# Altium footprint library TIE_2025.PcbLib: 27 footprints (part 2 of 2)
Each footprint in its own frame and in the unit in brackets; x right, y up, seen from the top. Pads: shape width x height; smd on the part's side, far side on the other; paste and mask are expansions set on the pad; w line width, h text height; cw(c..) or ccw(c..) is an arc to the next point about the centre after c.
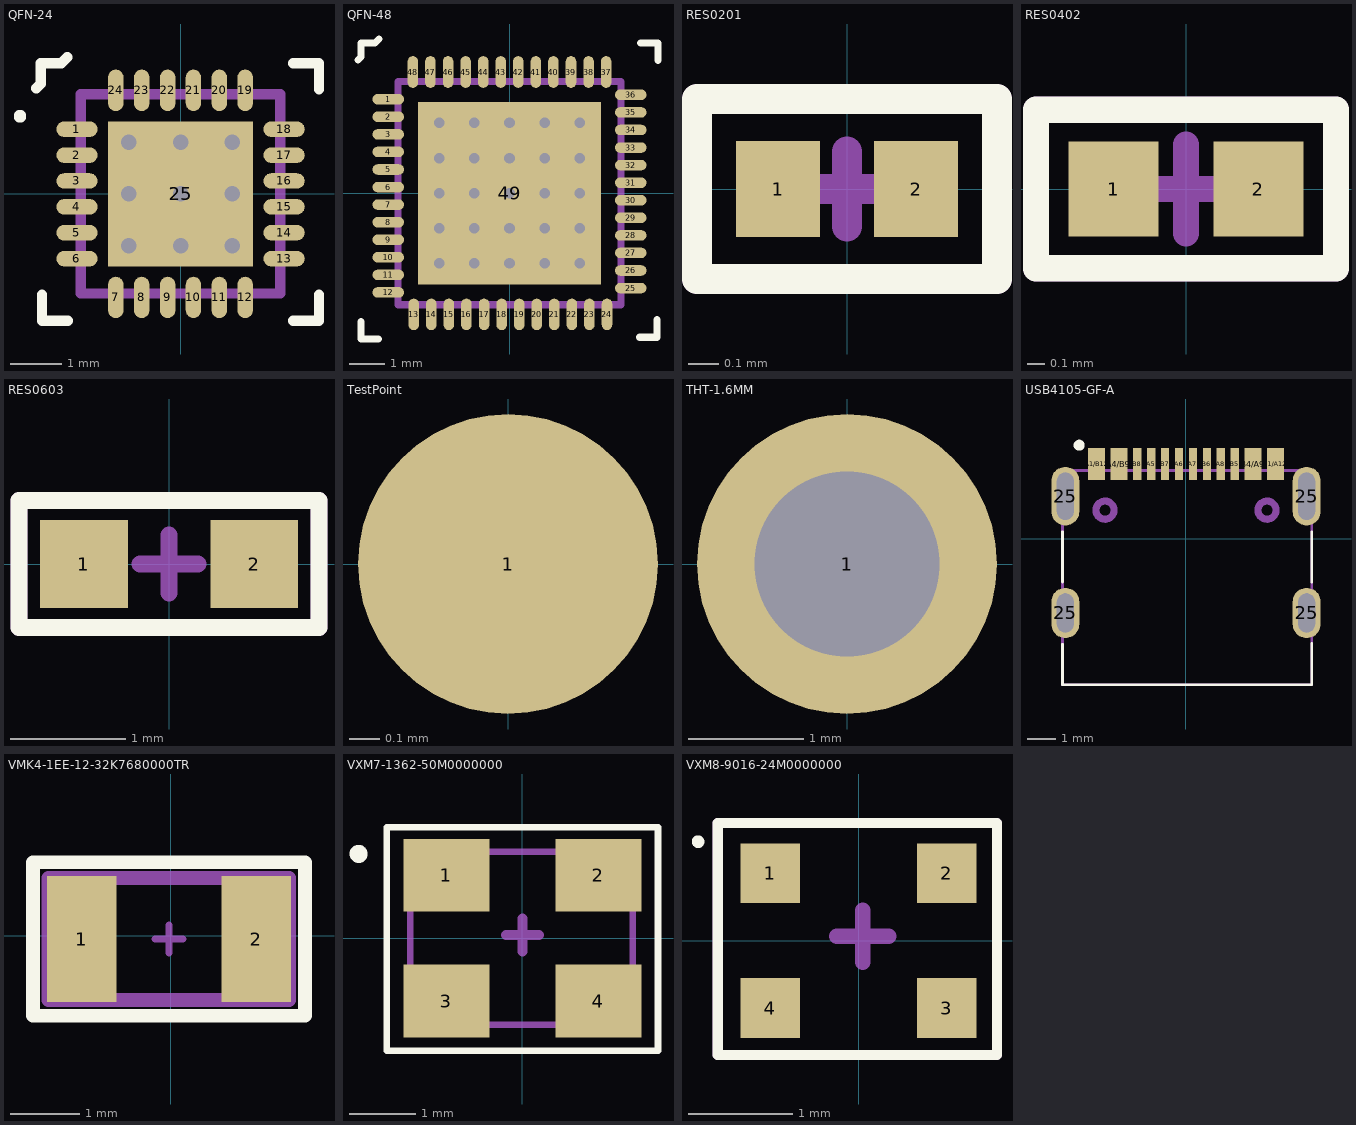
[diagram p1: the footprints below, top view; thin cyan lines are the x and y axes]

## QFN-24 [mm]
pads (25):
  oval 0.8x0.3 smd mask+0.05: 1(-2,1.25) 2(-2,0.75) 3(-2,0.25) 4(-2,-0.25) 5(-2,-0.75) 6(-2,-1.25) 13(2,-1.25) 14(2,-0.75) 15(2,-0.25) 16(2,0.25) 17(2,0.75) 18(2,1.25)
  oval 0.3x0.8 smd mask+0.05: 7(-1.25,-2) 8(-0.75,-2) 9(-0.25,-2) 10(0.25,-2) 11(0.75,-2) 12(1.25,-2) 19(1.25,2) 20(0.75,2) 21(0.25,2) 22(-0.25,2) 23(-0.75,2) 24(-1.25,2)
  rect 2.8x2.8 smd mask+0.05: 25(0,0)
via 1,0 diameter 0.5 hole 0.3
via 0,0 diameter 0.5 hole 0.3
via -1,0 diameter 0.5 hole 0.3
via 1,-1 diameter 0.5 hole 0.3
via 0,-1 diameter 0.5 hole 0.3
via -1,-1 diameter 0.5 hole 0.3
via 1,1 diameter 0.5 hole 0.3
via 0,1 diameter 0.5 hole 0.3
via -1,1 diameter 0.5 hole 0.3
Top Overlay:
  circle w0.2: c-3.1,1.5 r0.02
  lines w0.2: -2.786,2.04 -2.7,2.126 -2.7,2.525 -2.301,2.525 -2.186,2.64 ; -2.675,-1.95 -2.675,-2.45 -2.175,-2.45 ; 2.175,-2.45 2.675,-2.45 2.675,-1.95 ; 2.175,2.525 2.675,2.525 2.675,2.025
Top Component Center:
  lines w0.1: -0.125,0 0.125,0 ; 0,-0.125 0,0.125
Top Assembly:
  lines w0.2: -1.925,-1.925 -1.925,1.925 1.925,1.925 1.925,-1.925 -1.925,-1.925
  text ".Designator" at -0.579,-0.237 h0.5
Bottom Assembly (Mech12):
  lines w0.15: -0.25,0 0.25,0 ; 0,-0.25 0,0.25
3D body "MAX4996ETG+T.stp": height 0.8, standoff 0, extent -1.8,-1.8 1.8,1.8

## QFN-48 [mm]
pads (49):
  oval 0.9x0.3 smd mask+0.05: 1(-3.45,2.675) 2(-3.45,2.175) 3(-3.45,1.675) 4(-3.45,1.175) 5(-3.45,0.675) 6(-3.45,0.175) 7(-3.45,-0.325) 8(-3.45,-0.825) 9(-3.45,-1.325) 10(-3.45,-1.825) 11(-3.45,-2.325) 12(-3.45,-2.825) 25(3.45,-2.7) 26(3.45,-2.2) 27(3.45,-1.7) 28(3.45,-1.2) 29(3.45,-0.7) 30(3.45,-0.2) 31(3.45,0.3) 32(3.45,0.8) 33(3.45,1.3) 34(3.45,1.8) 35(3.45,2.3) 36(3.45,2.8)
  oval 0.3x0.9 smd mask+0.05: 13(-2.725,-3.45) 14(-2.225,-3.45) 15(-1.725,-3.45) 16(-1.225,-3.45) 17(-0.725,-3.45) 18(-0.225,-3.45) 19(0.275,-3.45) 20(0.775,-3.45) 21(1.275,-3.45) 22(1.775,-3.45) 23(2.275,-3.45) 24(2.775,-3.45) 37(2.75,3.45) 38(2.25,3.45) 39(1.75,3.45) 40(1.25,3.45) 41(0.75,3.45) 42(0.25,3.45) 43(-0.25,3.45) 44(-0.75,3.45) 45(-1.25,3.45) 46(-1.75,3.45) 47(-2.25,3.45) 48(-2.75,3.45)
  rect 5.2x5.2 smd paste-10 mask+0.05: 49(0,0)
via -2,2 diameter 0.5 hole 0.3
via -2,-2 diameter 0.5 hole 0.3
via -2,0 diameter 0.5 hole 0.3
via -2,-1 diameter 0.5 hole 0.3
via -2,1 diameter 0.5 hole 0.3
via 2,2 diameter 0.5 hole 0.3
via 2,-2 diameter 0.5 hole 0.3
via 2,0 diameter 0.5 hole 0.3
via 2,-1 diameter 0.5 hole 0.3
via 2,1 diameter 0.5 hole 0.3
via 1,2 diameter 0.5 hole 0.3
via 0,2 diameter 0.5 hole 0.3
via -1,2 diameter 0.5 hole 0.3
via 1,-2 diameter 0.5 hole 0.3
via 0,-2 diameter 0.5 hole 0.3
via -1,-2 diameter 0.5 hole 0.3
via 1,0 diameter 0.5 hole 0.3
via 0,0 diameter 0.5 hole 0.3
via -1,0 diameter 0.5 hole 0.3
via 1,-1 diameter 0.5 hole 0.3
via 0,-1 diameter 0.5 hole 0.3
via -1,-1 diameter 0.5 hole 0.3
via 1,1 diameter 0.5 hole 0.3
via 0,1 diameter 0.5 hole 0.3
via -1,1 diameter 0.5 hole 0.3
Top Overlay:
  lines w0.2: -4.311,3.79 -4.225,3.876 -4.225,4.275 -3.826,4.275 -3.711,4.39 ; -4.225,-3.65 -4.225,-4.15 -3.725,-4.15 ; 3.7,-4.1 4.2,-4.1 4.2,-3.6 ; 3.725,4.275 4.225,4.275 4.225,3.775
Top Paste:
  rectangle: -1.55,-1.55 -0.15,-0.15
  rectangle: -1.55,0.15 -0.15,1.55
  region: 1.55,1.55 0.15,1.55 0.15,0.15 1.55,0.15
  region: 1.55,-0.15 0.15,-0.15 0.15,-1.55 1.55,-1.55
Top Component Center:
  lines w0.1: -0.125,0 0.125,0 ; 0,-0.125 0,0.125
Top Assembly:
  lines w0.2: -3.175,-3.175 3.175,-3.175 3.175,3.175 -3.175,3.175 -3.175,-3.175
  text ".Designator" at -0.569,-0.247 h0.5
Bottom Assembly (Mech12):
  lines w0.15: -0.25,0 0.25,0 ; 0,-0.25 0,0.25
3D body "VSC8531XMW-01.stp": height 0.9, standoff 0, extent -3.05,-3.05 3.05,3.05

## RES0201 [mm]
pads (2):
  rect 0.28x0.32 smd mask+0.05: 1(-0.23,0) 2(0.23,0)
Top Overlay:
  lines w0.1: -0.5,-0.3 0.5,-0.3 0.5,0.3 -0.5,0.3 -0.5,-0.3
Top Component Center:
  lines w0.1: -0.125,0 0.125,0 ; 0,-0.125 0,0.125
Top Assembly:
  lines w0.1: -0.5,-0.3 -0.5,0.3 0.5,0.3 0.5,-0.3 -0.5,-0.3
  text ".Designator" at -0.559,-0.227 h0.5
3D body "User Library-res0201-1.step": height 0.23, standoff 0, extent -0.3,-0.15 0.3,0.15

## RES0402 [mm]
pads (2):
  rect 0.51x0.54 smd mask+0.05: 1(-0.41,0) 2(0.41,0)
Top Overlay:
  lines w0.15: -0.85,-0.45 0.85,-0.45 0.85,0.45 -0.85,0.45 -0.85,-0.45
Top Component Center:
  lines w0.15: -0.25,0 0.25,0 ; 0,-0.25 0,0.25
Top Assembly:
  lines w0.15: -0.85,-0.45 -0.85,0.45 0.85,0.45 0.85,-0.45 -0.85,-0.45
  text ".Designator" at -0.569,-0.247 h0.5
3D body "User Library-CR1005-0402.STEP": height 0.35, standoff 0, extent -0.5,-0.25 0.5,0.25

## RES0603 [mm]
pads (2):
  rect 0.76x0.76 smd mask+0.05: 1(-0.737,0) 2(0.738,0)
Top Overlay:
  lines w0.15: -1.3,-0.55 -1.3,0.55 1.3,0.55 1.3,-0.55 -1.3,-0.55
Top Component Center:
  lines w0.15: -0.25,0 0.25,0 ; 0,-0.25 0,0.25
Top Assembly:
  lines w0.15: -1.3,-0.55 -1.3,0.55 1.3,0.55 1.3,-0.55 -1.3,-0.55
  text ".Designator" at -0.559,-0.247 h0.5
3D body "0603_RES.stp": height 0.46, standoff 0, extent -0.8,-0.4 0.8,0.4

## TestPoint [mm]
pads (1):
  round 1 smd paste-10 mask+0.1: 1(0,0)
Bottom Assembly (Mech12):
  lines w0.15: -0.25,0 0.25,0 ; 0,-0.25 0,0.25

## THT-1.6MM [mm]
pads (1):
  round 2.6 hole 1.6 paste-2539.97 mask+0.05: 1(0,0)
Bottom Assembly (Mech12):
  lines w0.15: -0.25,0 0.25,0 ; 0,-0.25 0,0.25

## USB4105-GF-A [mm]
pads (16):
  oval 1x1.8 hole 0.6 slot 1.4 at 90 deg: 25(-4.32,-2.665) 25(4.32,-2.665)
  oval 1x2.1 hole 0.6 slot 1.7 at 90 deg: 25(-4.32,1.515) 25(4.32,1.515)
  rect 0.6x1.15 smd mask+0.05: A1/B12(-3.2,2.665) A4/B9(-2.4,2.665) B1/A12(3.2,2.665) B4/A9(2.4,2.665)
  rect 0.3x1.15 smd mask+0.05: A5(-1.25,2.665) A6(-0.25,2.665) A7(0.25,2.665) A8(1.25,2.665) B5(1.75,2.665) B6(0.75,2.665) B7(-0.75,2.665) B8(-1.75,2.665)
Top Overlay:
  circle w0.254: c-3.825,3.34 r0.071
  lines w0.1: -4.425,-3.785 -4.425,-5.235 4.5,-5.235 4.5,-3.76 ; -4.425,-1.56 -4.425,0.24 ; 4.5,-1.56 4.5,0.24
Top Assembly:
  circle w0.254: c2.9,1.015 r0.325
  circle w0.254: c-2.9,1.015 r0.325
  lines w0.1: -4.425,-5.235 4.5,-5.235 4.5,2.44 -4.425,2.44 -4.425,-5.235
  text ".Designator" at -0.579,-0.217 h0.5
3D body "USB4105-GF-A.stp": height 3.26, standoff -0.95, extent -4.445,-5.235 4.495,2.465

## VMK4-1EE-12-32K7680000TR [mm]
pads (2):
  rect 1x1.8 smd mask+0.05: 1(-1.273,-0.05) 2(1.227,-0.05)
Top Overlay:
  lines w0.2: -1.975,-1.15 1.925,-1.15 1.925,1.05 -1.975,1.05 -1.975,-1.15
Top Component Center:
  lines w0.1: -0.225,-0.05 0.175,-0.05 ; -0.025,-0.25 -0.025,0.15
Top Assembly:
  lines w0.2: -1.75,-0.925 -1.75,0.825 1.7,0.825 1.7,-0.925 -1.75,-0.925
  text ".Designator" at -0.599,-0.277 h0.5
3D body "ABS07-32.768KHZ-9-1.STEP": height 0.9, standoff 0, extent -1.625,-0.8 1.575,0.7

## VXM7-1362-50M0000000 [mm]
pads (4):
  rect 1.3x1.1 smd: 1(-1.15,0.95) 2(1.15,0.95) 3(-1.15,-0.95) 4(1.15,-0.95)
Top Layer:
Top Overlay:
  circle w0.254: c-2.475,1.275 r0.01
  lines w0.1: -2.05,-1.7 2.05,-1.7 2.05,1.675 -2.05,1.675 -2.05,-1.7
Top Component Center:
  lines w0.15: -0.25,0.05 0.25,0.05 ; 0,-0.2 0,0.3
Top Assembly:
  lines w0.1: -1.694,-1.311 1.669,-1.311 1.669,1.306 -1.694,1.306 -1.694,-1.311
  text ".Designator" at -0.579,-0.177 h0.5
3D body "VXM7_MCH.step": height 0.81, standoff 0, extent -1.658,-1.31 1.644,1.28

## VXM8-9016-24M0000000 [mm]
pads (4):
  rect 0.575x0.575 smd: 1(-0.85,0.65) 2(0.85,0.65) 3(0.85,-0.65) 4(-0.85,-0.65)
Top Overlay:
  circle w0.1: c-1.546,0.953 r0.01
  lines w0.1: -1.358,-1.103 1.334,-1.103 1.334,1.133 -1.358,1.133 -1.358,-1.103
Top Component Center:
  lines w0.15: -0.211,0.04 0.289,0.04 ; 0.039,-0.21 0.039,0.29
Top Assembly:
  lines w0.1: -1.358,-1.103 -1.358,1.133 1.334,1.133 1.334,-1.103 -1.333,-1.103
  text ".Designator" at -0.549,-0.187 h0.5
3D body "VXM8_MCH.step": height 0.71, standoff 0, extent -1.333,-1.078 1.309,1.082